# Altium footprint library Mikrokontroler.PcbLib: 1 footprints
Each footprint in its own frame and in the unit in brackets; x right, y up, seen from the top. Pads: shape width x height; smd on the part's side, far side on the other; paste and mask are expansions set on the pad; w line width, h text height; cw(c..) or ccw(c..) is an arc to the next point about the centre after c.
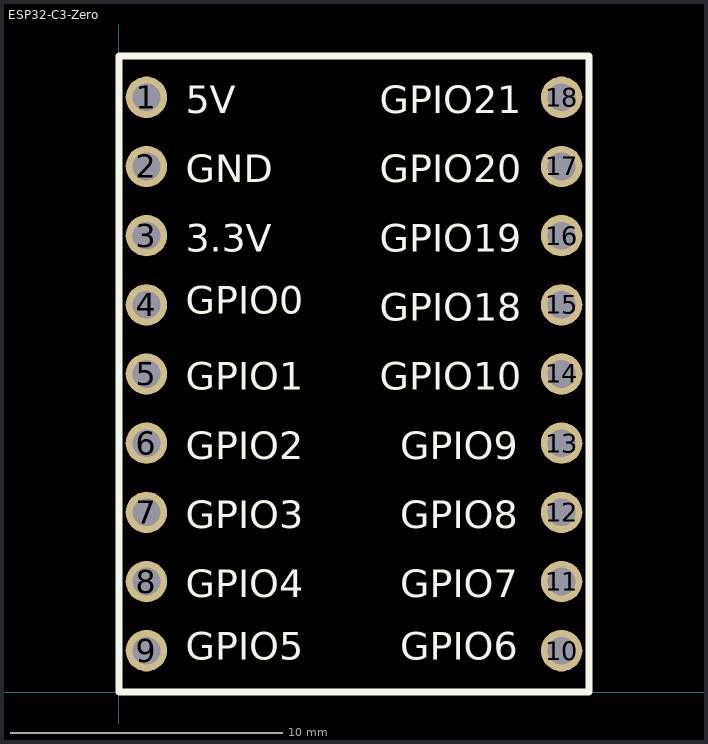
[diagram p0: the footprint, top view; thin cyan lines are the x and y axes]

## ESP32-C3-Zero [mil]
pads (18):
  round 60 hole 40: 1(40,860) 2(40,760) 3(40,660) 4(40,560) 5(40,460) 6(40,360) 7(40,260) 8(40,160) 9(40,60) 10(640,60) 11(640,160) 12(640,260) 13(640,360) 14(640,460) 15(640,560) 16(640,660) 17(640,760) 18(640,860)
Top Overlay:
  lines w10: 0,0 680,0 680,920 0,920 0,0
  text "GPIO21" at 377,837 h40
  text "GPIO20" at 377,737 h40
  text "GPIO19" at 377,637 h40
  text "GPIO18" at 377,537 h40
  text "GPIO10" at 377,437 h40
  text "GPIO9" at 407,337 h40
  text "GPIO8" at 407,237 h40
  text "GPIO7" at 407,137 h40
  text "GPIO6" at 407,47 h40
  text "GPIO5" at 97,47 h40
  text "GPIO4" at 97,137 h40
  text "GPIO3" at 97,237 h40
  text "GPIO2" at 97,337 h40
  text "GPIO1" at 97,437 h40
  text "GPIO0" at 97,547 h40
  text "3.3V" at 97,637 h40
  text "GND" at 97,737 h40
  text "5V" at 97,837 h40